# Altium footprint library Connectors.PcbLib: 320 footprints (part 18 of 20)
Each footprint in its own frame and in the unit in brackets; x right, y up, seen from the top. Pads: shape width x height; smd on the part's side, far side on the other; paste and mask are expansions set on the pad; w line width, h text height; cw(c..) or ccw(c..) is an arc to the next point about the centre after c.
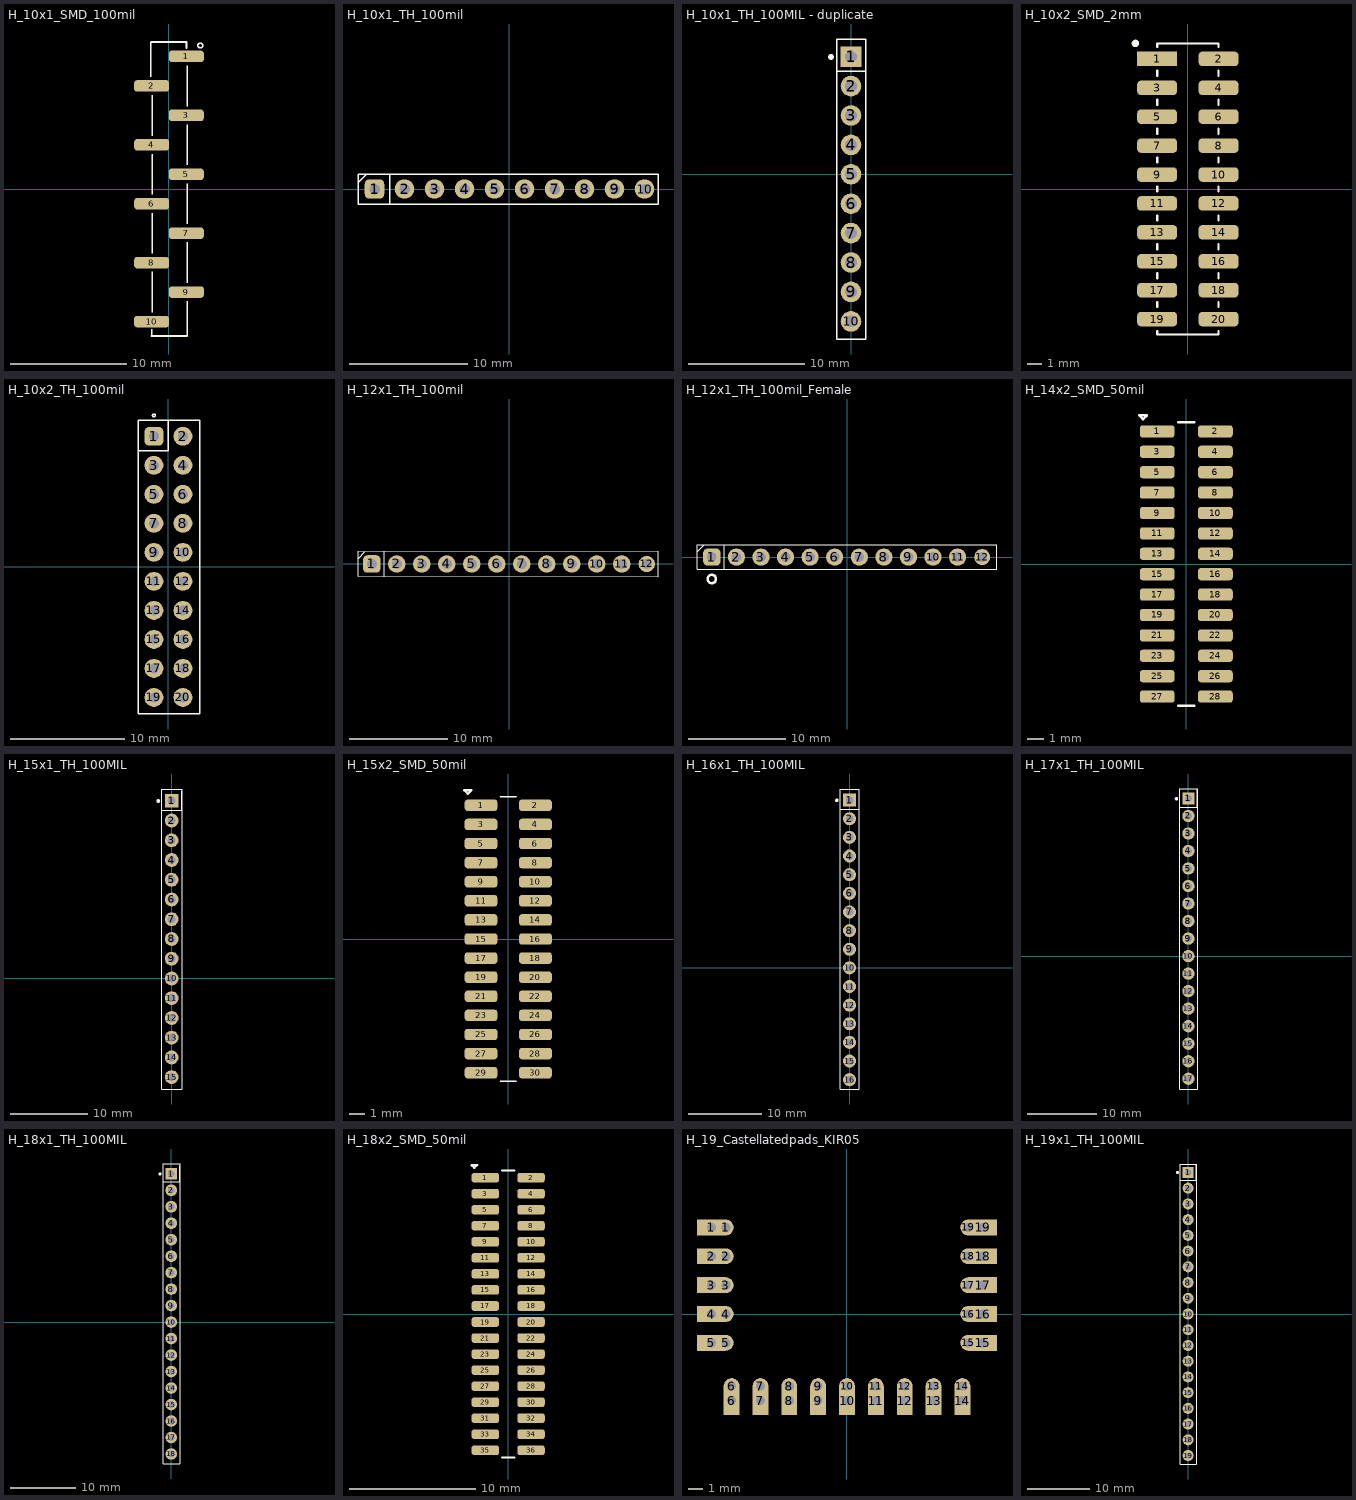
[diagram p17: the footprints below, top view; thin cyan lines are the x and y axes]

## H_10x1_SMD_100mil [mm] "/ 20210811 / V-A.Patino"
pads (10):
  rrect50% 3x1 smd: 1(1.5,11.43) 2(-1.5,8.89) 3(1.5,6.35) 4(-1.5,3.81) 5(1.5,1.27) 6(-1.5,-1.27) 7(1.5,-3.81) 8(-1.5,-6.35) 9(1.5,-8.89) 10(-1.5,-11.43)
Top Overlay:
  circle w0.127: c2.692,12.37 r0.209
  lines w0.127: -1.552,9.69 -1.552,12.675 ; -1.5,-12.675 -1.5,-12.09 ; -1.448,-10.63 -1.448,-7.15 ; -1.448,-5.55 -1.448,-2.07 ; -1.448,-0.47 -1.448,3.01 ; -1.448,4.61 -1.448,8.09 ; 1.527,-12.675 1.552,-12.649 1.552,-9.69 ; 1.552,-8.09 1.552,-4.61 ; 1.552,-3.01 1.552,0.47 ; 1.552,2.07 1.552,5.55 ; 1.552,7.15 1.552,10.63
  lines w0.152: -1.527,12.675 1.5,12.675 1.5,12.141 ; -1.5,-12.675 1.527,-12.675
3D body "s10129380-910002XLF.stp": height 11.9, standoff 0.01, extent -2.475,-12.7 2.323,12.7

## H_10x1_TH_100mil [mil] "/ 20190911 / C-D Viveros"
pads (10):
  rrect50% 65x65 hole 35: 1(-450,0)
  round 65 hole 35: 2(-350,0) 3(-250,0) 4(-150,0) 5(-50,0) 6(50,0) 7(150,0) 8(250,0) 9(350,0) 10(450,0)
Top Overlay:
  lines w5: -505,20.87 -475.87,50 ; -400,-50 -400,50 ; 494.49,50 -505,50 -505,-50 495,-50 495,50

## H_10x1_TH_100MIL - duplicate [mil] "/ 20231119 / J.Jaramillo"
height 335.04
pads (11):
  rect 70x70 hole 40: 1(0,400)
  round 70 hole 40: 2(0,300) 3(0,200) 4(0,100) 5(0,0) 6(0,-100) 7(0,-200) 8(0,-300) 9(0,-400) 10(0,-500)
  round 20 on Top Overlay: ""(-68,399)
Top Overlay:
  lines w5: -49,351 50.8,351 50.8,449 ; -49.21,-559.99 50.65,-559.99 50.65,460.01 -49.21,460.01 -49.21,-559.99
3D body "PPTC101LFBN-RC--3DModel-STEP-56544.STEP": height 335, standoff -126, extent -50,-559.99 50,460.01

## H_10x2_SMD_2mm [mm] "/20230119/J-A.Sepulveda"
pads (20):
  rect 2.75x1 smd: 1(-2.125,9)
  rrect50% 2.75x1 smd: 2(2.125,9) 3(-2.125,7) 4(2.125,7) 5(-2.125,5) 6(2.125,5) 7(-2.125,3) 8(2.125,3) 9(-2.125,1) 10(2.125,1) 11(-2.125,-1) 12(2.125,-1) 13(-2.125,-3) 14(2.125,-3) 15(-2.125,-5) 16(2.125,-5) 17(-2.125,-7) 18(2.125,-7) 19(-2.125,-9) 20(2.125,-9)
Top Overlay:
  circle w0.254: c-3.627,10.071 r0.127
  lines w0.152: -2.121,-9.828 -2.121,-10.071 2.121,-10.071 2.121,-9.828 ; -2.121,-8.172 -2.121,-7.828 ; -2.121,-6.172 -2.121,-5.828 ; -2.121,-4.172 -2.121,-3.828 ; -2.121,-2.172 -2.121,-1.828 ; -2.121,-0.172 -2.121,0.172 ; -2.121,1.828 -2.121,2.172 ; -2.121,3.828 -2.121,4.172 ; -2.121,5.828 -2.121,6.172 ; -2.121,7.828 -2.121,8.172 ; -2.121,9.828 -2.121,10.071 2.121,10.071 2.121,9.828 ; 2.121,-8.172 2.121,-7.828 ; 2.121,-6.172 2.121,-5.828 ; 2.121,-4.172 2.121,-3.828 ; 2.121,-2.172 2.121,-1.828 ; 2.121,-0.172 2.121,0.172 ; 2.121,1.828 2.121,2.172 ; 2.121,3.828 2.121,4.172 ; 2.121,5.828 2.121,6.172 ; 2.121,7.828 2.121,8.172
Bottom Overlay:
  circle w0.254: c-3.627,10.071 r0.127
3D body "877592074.stp": height 6.51, standoff 0.01, extent -2.75,-9.95 2.75,9.95

## H_10x2_TH_100mil [mil] "/ 20190625 / J-P.Vargas.A"
pads (20):
  rrect50% 65x65 hole 35: 1(-50,450)
  round 65 hole 35: 2(50,450) 3(-50,350) 4(50,350) 5(-50,250) 6(50,250) 7(-50,150) 8(50,150) 9(-50,50) 10(50,50) 11(-50,-50) 12(50,-50) 13(-50,-150) 14(50,-150) 15(-50,-250) 16(50,-250) 17(-50,-350) 18(50,-350) 19(-50,-450) 20(50,-450)
Top Overlay:
  circle w5: c-50,522 r4.92
  lines w5: -104,400 0,400 0,506 ; -104,-507 -104,506 108,506 108,-507 -104,-507
3D body "HDR 20 pin.STEP": height 330, standoff -100, extent -99,-499 101,501

## H_12x1_TH_100mil [mil] "/ 20210906/ V-A.Patino"
pads (12):
  rrect50% 70x70 hole 40: 1(-550,0)
  round 70 hole 40: 2(-450,0) 3(-350,0) 4(-250,0) 5(-150,0) 6(-50,0) 7(50,0) 8(150,0) 9(250,0) 10(350,0) 11(450,0)
  round 65 hole 40: 12(550,0)
Top Overlay:
  lines w5: -605,20.87 -575.87,50 ; -500,-50 -500,50 ; -605,-50 595,-50 595,50 -605,50 -605,-50
3D body "PRPC012SAAN-RC.STEP": height 300.5, standoff -119.58, extent -602.5,-52.5 597.5,47.5

## H_12x1_TH_100mil_Female [mil] "/ 20210906/ V-A.Patino"
pads (12):
  rrect50% 70x70 hole 40: 1(-550,0)
  round 70 hole 40: 2(-450,0) 3(-350,0) 4(-250,0) 5(-150,0) 6(-50,0) 7(50,0) 8(150,0) 9(250,0) 10(350,0) 11(450,0)
  round 65 hole 40: 12(550,0)
Top Overlay:
  circle w10: c-550,-89 r17.03
  lines w5: -610,20.87 -580.87,50 ; -500,-50 -500,50 ; -610.24,-50 -610.24,50 610.24,50 610.24,-50 -610.24,-50
3D body "SSW-112-02-T-S.stp": height 335.5, standoff -193.5, extent -610,-47.5 610,47.5

## H_14x2_SMD_50mil [mm] "/ 20220119/ C-D Viveros"
pads (28):
  rrect50% 2.17x0.76 smd paste+0 mask+0.05: 1(-1.81,8.255) 2(1.81,8.255) 3(-1.81,6.985) 4(1.81,6.985) 5(-1.81,5.715) 6(1.81,5.715) 7(-1.81,4.445) 8(1.81,4.445) 9(-1.81,3.175) 10(1.81,3.175) 11(-1.81,1.905) 12(1.81,1.905) 13(-1.81,0.635) 14(1.81,0.635) 15(-1.81,-0.635) 16(1.81,-0.635) 17(-1.81,-1.905) 18(1.81,-1.905) 19(-1.81,-3.175) 20(1.81,-3.175) 21(-1.81,-4.445) 22(1.81,-4.445) 23(-1.81,-5.715) 24(1.81,-5.715) 25(-1.81,-6.985) 26(1.81,-6.985) 27(-1.81,-8.255) 28(1.81,-8.255)
Top Overlay:
  lines w0.127: -0.504,-8.826 0.504,-8.826 ; -0.504,8.826 0.504,8.826
  lines w0.152: -2.698,9.025 -2.927,9.255 -2.448,9.255 -2.677,9.025 ; -2.698,9.025 -2.677,9.025 ; -2.698,9.025 -2.677,9.025
3D body "BD095-28A-A0-0300-0050-0570-L-B.stp": height 5.01, standoff 0.01, extent -2.85,-8.89 2.85,8.89

## H_15x1_TH_100MIL [mil] "/ 20240329 / J.Jaramillo"
height 335.04
pads (16):
  rect 70x70 hole 40: 1(0,900)
  round 70 hole 40: 2(0,800) 3(0,700) 4(0,600) 5(0,500) 6(0,400) 7(0,300) 8(0,200) 9(0,100) 10(0,0) 11(0,-100) 12(0,-200) 13(0,-300) 14(0,-400) 15(0,-500)
  round 20 on Top Overlay: ""(-68,899)
Top Overlay:
  lines w5: -49,851 50.8,851 50.8,949 ; -49.21,-560 50.65,-560 50.65,959.78 -49.21,959.78 -49.21,-560
3D body "_ _ _C151LFBN-RC.STEP": height 334.65, standoff -125.98, extent -49.21,-559.96 50.79,959.73

## H_15x2_SMD_50mil [mm] "/ 20220908/ N-A.Potosi"
pads (30):
  rrect50% 2.17x0.76 smd paste+0 mask+0.05: 1(-1.81,8.89) 2(1.81,8.89) 3(-1.81,7.62) 4(1.81,7.62) 5(-1.81,6.35) 6(1.81,6.35) 7(-1.81,5.08) 8(1.81,5.08) 9(-1.81,3.81) 10(1.81,3.81) 11(-1.81,2.54) 12(1.81,2.54) 13(-1.81,1.27) 14(1.81,1.27) 15(-1.81,0) 16(1.81,0) 17(-1.81,-1.27) 18(1.81,-1.27) 19(-1.81,-2.54) 20(1.81,-2.54) 21(-1.81,-3.81) 22(1.81,-3.81) 23(-1.81,-5.08) 24(1.81,-5.08) 25(-1.81,-6.35) 26(1.81,-6.35) 27(-1.81,-7.62) 28(1.81,-7.62) 29(-1.81,-8.89) 30(1.81,-8.89)
Top Overlay:
  lines w0.127: -0.504,-9.461 0.504,-9.461 ; -0.504,9.461 0.504,9.461
  lines w0.152: -2.698,9.66 -2.677,9.66 ; -2.698,9.66 -2.677,9.66 ; -2.698,9.66 -2.927,9.89 -2.448,9.89 -2.677,9.66
3D body "BD095-30A-A0-0200-0050-0500-L-B.stp": height 4.01, standoff 0.01, extent -2.85,-9.525 2.85,9.525

## H_16x1_TH_100MIL [mil] "/ 20240316 / J.Jaramillo"
height 335.04
pads (17):
  rect 70x70 hole 40: 1(0,900)
  round 70 hole 40: 2(0,800) 3(0,700) 4(0,600) 5(0,500) 6(0,400) 7(0,300) 8(0,200) 9(0,100) 10(0,0) 11(0,-100) 12(0,-200) 13(0,-300) 14(0,-400) 15(0,-500) 16(0,-600)
  round 20 on Top Overlay: ""(-68,899)
Top Overlay:
  lines w5: -49,851 50.8,851 50.8,949 ; -49.21,-650 50.65,-650 50.65,959.78 -49.21,959.78 -49.21,-650
3D body "PPTC161LFBN-RC.STEP": height 335, standoff -126, extent -49.69,-660.22 50.31,959.78

## H_17x1_TH_100MIL [mil] "/ 20231112 / J.Jaramillo"
height 335.04
pads (18):
  rect 70x70 hole 40: 1(0,900)
  round 70 hole 40: 2(0,800) 3(0,700) 4(0,600) 5(0,500) 6(0,400) 7(0,300) 8(0,200) 9(0,100) 10(0,0) 11(0,-100) 12(0,-200) 13(0,-300) 14(0,-400) 15(0,-500) 16(0,-600) 17(0,-700)
  round 20 on Top Overlay: ""(-68,899)
Top Overlay:
  lines w5: -49,851 50.8,851 50.8,949 ; -49.21,-758.66 50.65,-758.66 50.65,953.94 -49.21,953.94 -49.21,-758.66
3D body "PPTC171LFBN-RC--3DModel-STEP-56544.STEP": height 335, standoff -126, extent -50,-759.99 50,960.01

## H_18x1_TH_100MIL [mil] "/ 20231105 / J.Jaramillo"
height 335.04
pads (19):
  rect 70x70 hole 40: 1(0,900)
  round 70 hole 40: 2(0,800) 3(0,700) 4(0,600) 5(0,500) 6(0,400) 7(0,300) 8(0,200) 9(0,100) 10(0,0) 11(0,-100) 12(0,-200) 13(0,-300) 14(0,-400) 15(0,-500) 16(0,-600) 17(0,-700) 18(0,-800)
  round 20 on Top Overlay: ""(-68,899)
Top Overlay:
  lines w5: -49,851 50.8,851 50.8,949 ; -49.21,-860.79 50.65,-860.79 50.65,959.21 -49.21,959.21 -49.21,-860.79
3D body "PPTC181LFBN-RC--3DModel-STEP-56544.STEP": height 126, standoff -335, extent -49.55,-860.79 50.45,959.21

## H_18x2_SMD_50mil [mm] "/ 20220119 / C-D Viveros"
pads (36):
  rrect50% 2.17x0.76 smd paste+0 mask+0.05: 1(-1.81,10.795) 2(1.81,10.795) 3(-1.81,9.525) 4(1.81,9.525) 5(-1.81,8.255) 6(1.81,8.255) 7(-1.81,6.985) 8(1.81,6.985) 9(-1.81,5.715) 10(1.81,5.715) 11(-1.81,4.445) 12(1.81,4.445) 13(-1.81,3.175) 14(1.81,3.175) 15(-1.81,1.905) 16(1.81,1.905) 17(-1.81,0.635) 18(1.81,0.635) 19(-1.81,-0.635) 20(1.81,-0.635) 21(-1.81,-1.905) 22(1.81,-1.905) 23(-1.81,-3.175) 24(1.81,-3.175) 25(-1.81,-4.445) 26(1.81,-4.445) 27(-1.81,-5.715) 28(1.81,-5.715) 29(-1.81,-6.985) 30(1.81,-6.985) 31(-1.81,-8.255) 32(1.81,-8.255) 33(-1.81,-9.525) 34(1.81,-9.525) 35(-1.81,-10.795) 36(1.81,-10.795)
Top Overlay:
  lines w0.127: -0.504,-11.366 0.504,-11.366 ; -0.504,11.367 0.504,11.367
  lines w0.152: -2.698,11.565 -2.677,11.565 ; -2.698,11.565 -2.677,11.565 ; -2.698,11.565 -2.927,11.795 -2.448,11.795 -2.677,11.565
3D body "BD095-36A-A0-0300-0050-0570-L-B.stp": height 5.01, standoff 0.01, extent -2.85,-11.43 2.85,11.43

## H_19_Castellatedpads_KIR05 [mm] "/20200825/M-C.Calderon"
pads (38):
  rect 2x1.1 hole 0.635: 1(-9.4,6) 2(-9.4,4) 3(-9.4,2) 4(-9.4,0) 5(-9.4,-2) 15(9.4,-2) 16(9.4,0) 17(9.4,2) 18(9.4,4) 19(9.4,6)
  round 1.1 hole 0.635: 1(-8.4,6) 2(-8.4,4) 3(-8.4,2) 4(-8.4,0) 5(-8.4,-2) 6(-8,-5) 7(-6,-5) 8(-4,-5) 9(-2,-5) 10(0,-5) 11(2,-5) 12(4,-5) 13(6,-5) 14(8,-5) 15(8.4,-2) 16(8.4,0) 17(8.4,2) 18(8.4,4) 19(8.4,6)
  rect 1.1x2 hole 0.635: 6(-8,-6) 7(-6,-6) 8(-4,-6) 9(-2,-6) 10(0,-6) 11(2,-6) 12(4,-6) 13(6,-6) 14(8,-6)

## H_19x1_TH_100MIL [mil] "/ 20231103 / J.Jaramillo"
height 335.04
pads (20):
  rect 70x70 hole 40: 1(0,900)
  round 70 hole 40: 2(0,800) 3(0,700) 4(0,600) 5(0,500) 6(0,400) 7(0,300) 8(0,200) 9(0,100) 10(0,0) 11(0,-100) 12(0,-200) 13(0,-300) 14(0,-400) 15(0,-500) 16(0,-600) 17(0,-700) 18(0,-800) 19(0,-900)
  round 20 on Top Overlay: ""(-68,899)
Top Overlay:
  lines w5: -49,851 50.8,851 50.8,949 ; -49.21,-953.94 50.65,-953.94 50.65,953.94 -49.21,953.94 -49.21,-953.94
3D body "female_header_a-bl254-eg-z19d.stp": height 334.65, standoff -125.98, extent -47.24,-955.07 51.18,954.78